# Altium footprint library Package_DFN_QFN.PcbLib: 735 footprints (part 5 of 46)
Each footprint in its own frame and in the unit in brackets; x right, y up, seen from the top. Pads: shape width x height; smd on the part's side, far side on the other; paste and mask are expansions set on the pad; w line width, h text height; cw(c..) or ccw(c..) is an arc to the next point about the centre after c.
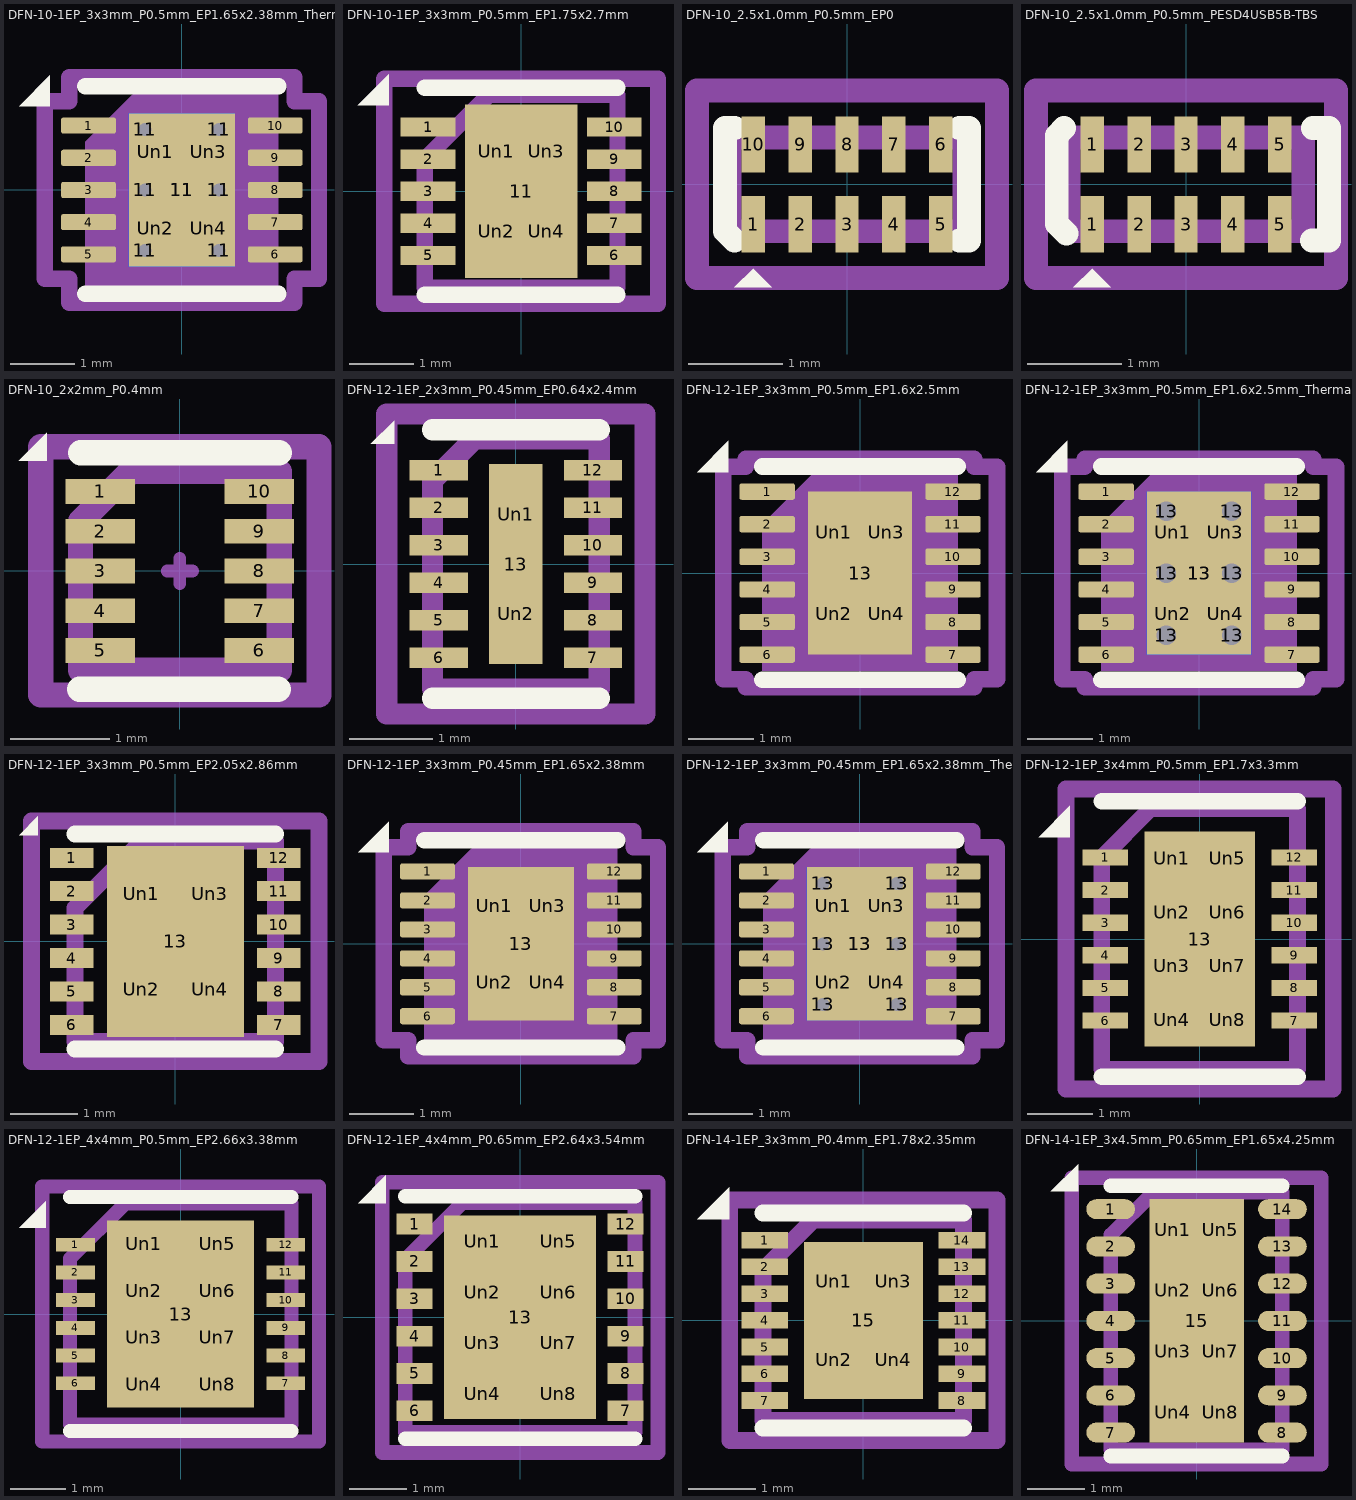
[diagram p4: the footprints below, top view; thin cyan lines are the x and y axes]

## DFN-10-1EP_3x3mm_P0.5mm_EP1.65x2.38mm_ThermalVias [mm] "DFN-10-1EP_3x3mm_P0.5mm_EP1.65x2.38mm_ThermalVias"
pads (22):
  rrect25% 0.85x0.25 smd: 1(-1.45,1) 2(-1.45,0.5) 3(-1.45,0) 4(-1.45,-0.5) 5(-1.45,-1) 6(1.45,-1) 7(1.45,-0.5) 8(1.45,0) 9(1.45,0.5) 10(1.45,1)
  round 0.5 hole 0.2: 11(-0.575,-0.94) 11(-0.575,0) 11(-0.575,0.94) 11(0.575,-0.94) 11(0.575,0) 11(0.575,0.94)
  rect 1.65x2.38 smd: 11(0,0)
  rect 1.65x2.38 smd far side: 11(0,0)
  rrect25% 0.67x0.96 on Top Paste: Un1(-0.41,0.595) Un2(-0.41,-0.595) Un3(0.41,0.595) Un4(0.41,-0.595)
F.SilkS:
  region: -2.05,1.3 -2.53,1.3 -2.05,1.78
  lines w0.254: -1.5,-1.61 1.5,-1.61 ; -1.5,1.61 1.5,1.61
Top Component Center:
  lines w0.127: -0.127,0 0.127,0 -0.127,0 ; 0,-0.127 0,0.127 0,-0.127
Top Assembly:
  region: 1.5,-1.5 -1.5,-1.5 -1.5,0.75 -0.75,1.5 1.5,1.5
Top Courtyard:
  lines w0.254: -2.13,-1.38 -1.75,-1.38 -1.75,-1.75 1.75,-1.75 1.75,-1.38 2.13,-1.38 2.13,1.38 1.75,1.38 1.75,1.75 -1.75,1.75 -1.75,1.38 -2.13,1.38 -2.13,-1.38
Top Designator:
  text ".Designator" at -3.43,-0.344 h1.52
3D body "DFN-10-1EP_3x3mm_P0.5mm_EP1.65x2.38mm.step": height 0.76, standoff 0, extent -1.5,-1.488 1.5,1.488

## DFN-10-1EP_3x3mm_P0.5mm_EP1.75x2.7mm [mm] "DFN-10-1EP_3x3mm_P0.5mm_EP1.75x2.7mm"
pads (15):
  rect 0.85x0.3 smd: 1(-1.45,1) 2(-1.45,0.5) 3(-1.45,0) 4(-1.45,-0.5) 5(-1.45,-1) 6(1.45,-1) 7(1.45,-0.5) 8(1.45,0) 9(1.45,0.5) 10(1.45,1)
  rect 1.75x2.7 smd: 11(0,0)
  rect 0.6x1.05 on Top Paste: Un1(-0.387,0.62) Un2(-0.387,-0.62) Un3(0.387,0.62) Un4(0.387,-0.62)
F.SilkS:
  region: -2.06,1.34 -2.54,1.34 -2.06,1.82
  lines w0.254: -1.5,-1.61 1.5,-1.61 ; -1.5,1.61 1.5,1.61
Top Component Center:
  lines w0.127: -0.127,0 0.127,0 -0.127,0 ; 0,-0.127 0,0.127 0,-0.127
Top Assembly:
  lines w0.254: -1.5,-1.5 1.5,-1.5 1.5,1.5 -0.5,1.5 -1.5,0.5 -1.5,-1.5
Top Courtyard:
  lines w0.254: -2.13,-1.75 2.13,-1.75 2.13,1.75 -2.13,1.75 -2.13,-1.75
Top Designator:
  text ".Designator" at -3.43,-0.344 h1.52
3D body "DFN-10-1EP_3x3mm_P0.5mm_EP1.55x2.48mm.step": height 0.77, standoff 0, extent -1.5,-1.49 1.5,1.49

## DFN-10_2.5x1.0mm_P0.5mm_EP0 [mm]
pads (10):
  rect 0.25x0.6 smd: 1(-1,-0.425) 2(-0.5,-0.425) 3(0,-0.425) 4(0.5,-0.425) 5(1,-0.425) 6(1,0.425) 7(0.5,0.425) 8(0,0.425) 9(-0.5,0.425) 10(-1,0.425)
F.SilkS:
  region: -0.8,-1.1 -1.2,-1.1 -1,-0.9
  lines w0.254: -1.2,-0.6 -1.3,-0.5 -1.3,0.5 -1.3,0.6 -1.2,0.6 ; 1.2,-0.6 1.3,-0.6 1.3,0.6 1.2,0.6
Top Assembly:
  region: -0.8,-1.1 -1.2,-1.1 -1,-0.9
  lines w0.254: -1.25,-0.5 -1.25,0.5 1.25,0.5 1.25,-0.5 -1.25,-0.5
  text "'.Designator'" at -3.07,-0.287 h1.27
Top Courtyard:
  lines w0.254: -1.6,-1 -1.6,1 1.6,1 1.6,-1 -1.6,-1
3D body "DFN-10_2.5x1.0mm_P0.5mm_EP0.stp": height 0.79, standoff 0.04, extent -1.25,-0.425 1.25,0.575

## DFN-10_2.5x1.0mm_P0.5mm_PESD4USB5B-TBS [mm]
pads (10):
  rect 0.25x0.6 smd: 1(-1,-0.425) 1(-1,0.425) 2(-0.5,-0.425) 2(-0.5,0.425) 3(0,-0.425) 3(0,0.425) 4(0.5,-0.425) 4(0.5,0.425) 5(1,-0.425) 5(1,0.425)
F.SilkS:
  region: -0.8,-1.1 -1.2,-1.1 -1,-0.9
  lines w0.254: -1.3,0.6 -1.378,0.522 -1.378,-0.422 -1.275,-0.525 ; 1.343,-0.6 1.524,-0.6 1.524,0.6 1.352,0.6
Top Assembly:
  region: -0.8,-1.1 -1.2,-1.1 -1,-0.9
  lines w0.254: -1.25,-0.5 -1.25,0.5 1.25,0.5 1.25,-0.5 -1.25,-0.5
  text "'.Designator'" at -3.07,-0.287 h1.27
Top Courtyard:
  lines w0.254: -1.6,-1 1.6,-1 1.6,1 -1.6,1 -1.6,-1
3D body "DFN-10_2.5x1.0mm_P0.5mm_EP0.stp": height 0.79, standoff 0.04, extent -1.25,-0.425 1.25,0.575

## DFN-10_2x2mm_P0.4mm [mm] "DFN-10_2x2mm_P0.4mm"
pads (10):
  rect 0.7x0.25 smd: 1(-0.8,0.8) 2(-0.8,0.4) 3(-0.8,0) 4(-0.8,-0.4) 5(-0.8,-0.8) 6(0.8,-0.8) 7(0.8,-0.4) 8(0.8,0) 9(0.8,0.4) 10(0.8,0.8)
F.SilkS:
  region: -1.34,1.11 -1.62,1.11 -1.34,1.39
  lines w0.254: -1.01,-1.19 0.99,-1.19 ; -1,1.19 1,1.19
Top Component Center:
  lines w0.127: -0.127,0 0.127,0 -0.127,0 ; 0,-0.127 0,0.127 0,-0.127
Top Assembly:
  lines w0.254: -1,-1 -1,0.5 -0.5,1 1,1 1,-1 -1,-1
Top Courtyard:
  lines w0.254: -1.4,-1.25 -1.4,1.25 1.4,1.25 1.4,-1.25 -1.4,-1.25
Top Designator:
  text ".Designator" at -2.251,-0.226 h1

## DFN-12-1EP_2x3mm_P0.45mm_EP0.64x2.4mm [mm] "DFN-12-1EP_2x3mm_P0.45mm_EP0.64x2.4mm"
pads (15):
  rect 0.7x0.25 smd: 1(-0.925,1.125) 2(-0.925,0.675) 3(-0.925,0.225) 4(-0.925,-0.225) 5(-0.925,-0.675) 6(-0.925,-1.125) 7(0.925,-1.125) 8(0.925,-0.675) 9(0.925,-0.225) 10(0.925,0.225) 11(0.925,0.675) 12(0.925,1.125)
  rect 0.64x2.4 smd: 13(0,0)
  rect 0.5x1 on Top Paste: Un1(0,0.6) Un2(0,-0.6)
F.SilkS:
  region: -1.46,1.44 -1.74,1.44 -1.46,1.72
  lines w0.254: -1,-1.61 1,-1.61 ; -1,1.61 1,1.61
Top Component Center:
  lines w0.127: -0.127,0 0.127,0 -0.127,0 ; 0,-0.127 0,0.127 0,-0.127
Top Assembly:
  lines w0.254: -1,-1.5 1,-1.5 1,1.5 -0.5,1.5 -1,1 -1,-1.5
Top Courtyard:
  lines w0.254: -1.55,-1.8 1.55,-1.8 1.55,1.8 -1.55,1.8 -1.55,-1.8
Top Designator:
  text ".Designator" at -2.251,-0.226 h1
3D body "DFN-12-1EP_2x3mm_P0.45mm_EP0.64x2.4mm.step": height 0.77, standoff 0, extent -1,-1.49 1,1.49

## DFN-12-1EP_3x3mm_P0.5mm_EP1.6x2.5mm [mm] "DFN-12-1EP_3x3mm_P0.5mm_EP1.6x2.5mm"
pads (17):
  rrect25% 0.85x0.25 smd: 1(-1.425,1.25) 2(-1.425,0.75) 3(-1.425,0.25) 4(-1.425,-0.25) 5(-1.425,-0.75) 6(-1.425,-1.25) 7(1.425,-1.25) 8(1.425,-0.75) 9(1.425,-0.25) 10(1.425,0.25) 11(1.425,0.75) 12(1.425,1.25)
  rect 1.6x2.5 smd: 13(0,0)
  rrect25% 0.64x1.01 on Top Paste: Un1(-0.4,0.625) Un2(-0.4,-0.625) Un3(0.4,0.625) Un4(0.4,-0.625)
F.SilkS:
  region: -2.02,1.55 -2.5,1.55 -2.02,2.03
  lines w0.254: -1.5,-1.635 1.5,-1.635 ; -1.5,1.635 1.5,1.635
Top Component Center:
  lines w0.127: -0.127,0 0.127,0 -0.127,0 ; 0,-0.127 0,0.127 0,-0.127
Top Assembly:
  region: 1.5,-1.5 -1.5,-1.5 -1.5,0.75 -0.75,1.5 1.5,1.5
Top Courtyard:
  lines w0.254: -2.1,-1.63 -1.75,-1.63 -1.75,-1.75 1.75,-1.75 1.75,-1.63 2.1,-1.63 2.1,1.63 1.75,1.63 1.75,1.75 -1.75,1.75 -1.75,1.63 -2.1,1.63 -2.1,-1.63
Top Designator:
  text ".Designator" at -3.43,-0.344 h1.52

## DFN-12-1EP_3x3mm_P0.5mm_EP1.6x2.5mm_ThermalVias [mm] "DFN-12-1EP_3x3mm_P0.5mm_EP1.6x2.5mm_ThermalVias"
pads (24):
  rrect25% 0.85x0.25 smd: 1(-1.425,1.25) 2(-1.425,0.75) 3(-1.425,0.25) 4(-1.425,-0.25) 5(-1.425,-0.75) 6(-1.425,-1.25) 7(1.425,-1.25) 8(1.425,-0.75) 9(1.425,-0.25) 10(1.425,0.25) 11(1.425,0.75) 12(1.425,1.25)
  round 0.6 hole 0.3: 13(-0.5,-0.95) 13(-0.5,0) 13(-0.5,0.95) 13(0.5,-0.95) 13(0.5,0) 13(0.5,0.95)
  rect 1.6x2.5 smd: 13(0,0)
  rect 1.6x2.5 smd far side: 13(0,0)
  rrect25% 0.64x1.01 on Top Paste: Un1(-0.4,0.625) Un2(-0.4,-0.625) Un3(0.4,0.625) Un4(0.4,-0.625)
F.SilkS:
  region: -2.02,1.55 -2.5,1.55 -2.02,2.03
  lines w0.254: -1.5,-1.635 1.5,-1.635 ; -1.5,1.635 1.5,1.635
Top Component Center:
  lines w0.127: -0.127,0 0.127,0 -0.127,0 ; 0,-0.127 0,0.127 0,-0.127
Top Assembly:
  region: 1.5,-1.5 -1.5,-1.5 -1.5,0.75 -0.75,1.5 1.5,1.5
Top Courtyard:
  lines w0.254: -2.1,-1.63 -1.75,-1.63 -1.75,-1.75 1.75,-1.75 1.75,-1.63 2.1,-1.63 2.1,1.63 1.75,1.63 1.75,1.75 -1.75,1.75 -1.75,1.63 -2.1,1.63 -2.1,-1.63
Top Designator:
  text ".Designator" at -3.43,-0.344 h1.52

## DFN-12-1EP_3x3mm_P0.5mm_EP2.05x2.86mm [mm] "DFN-12-1EP_3x3mm_P0.5mm_EP2.05x2.86mm"
pads (17):
  rect 0.65x0.3 smd: 1(-1.55,1.25) 2(-1.55,0.75) 3(-1.55,0.25) 4(-1.55,-0.25) 5(-1.55,-0.75) 6(-1.55,-1.25) 7(1.55,-1.25) 8(1.55,-0.75) 9(1.55,-0.25) 10(1.55,0.25) 11(1.55,0.75) 12(1.55,1.25)
  rect 2.05x2.86 smd: 13(0,0)
  rect 0.8x1.2 on Top Paste: Un1(-0.513,0.715) Un2(-0.513,-0.715) Un3(0.513,0.715) Un4(0.513,-0.715)
F.SilkS:
  region: -2.06,1.59 -2.34,1.59 -2.06,1.87
  lines w0.254: -1.5,-1.61 1.5,-1.61 ; -1.5,1.61 1.5,1.61
Top Component Center:
  lines w0.127: -0.127,0 0.127,0 -0.127,0 ; 0,-0.127 0,0.127 0,-0.127
Top Assembly:
  lines w0.254: -1.5,-1.5 1.5,-1.5 1.5,1.5 -0.5,1.5 -1.5,0.5 -1.5,-1.5
Top Courtyard:
  lines w0.254: -2.15,-1.8 2.15,-1.8 2.15,1.8 -2.15,1.8 -2.15,-1.8
Top Designator:
  text ".Designator" at -3.43,-0.344 h1.52

## DFN-12-1EP_3x3mm_P0.45mm_EP1.65x2.38mm [mm] "DFN-12-1EP_3x3mm_P0.45mm_EP1.65x2.38mm"
pads (17):
  rrect25% 0.85x0.25 smd: 1(-1.45,1.125) 2(-1.45,0.675) 3(-1.45,0.225) 4(-1.45,-0.225) 5(-1.45,-0.675) 6(-1.45,-1.125) 7(1.45,-1.125) 8(1.45,-0.675) 9(1.45,-0.225) 10(1.45,0.225) 11(1.45,0.675) 12(1.45,1.125)
  rect 1.65x2.38 smd: 13(0,0)
  rrect25% 0.67x0.96 on Top Paste: Un1(-0.41,0.595) Un2(-0.41,-0.595) Un3(0.41,0.595) Un4(0.41,-0.595)
F.SilkS:
  region: -2.05,1.42 -2.53,1.42 -2.05,1.9
  lines w0.254: -1.5,-1.61 1.5,-1.61 ; -1.5,1.61 1.5,1.61
Top Component Center:
  lines w0.127: -0.127,0 0.127,0 -0.127,0 ; 0,-0.127 0,0.127 0,-0.127
Top Assembly:
  region: 1.5,-1.5 -1.5,-1.5 -1.5,0.75 -0.75,1.5 1.5,1.5
Top Courtyard:
  lines w0.254: -2.13,-1.5 -1.75,-1.5 -1.75,-1.75 1.75,-1.75 1.75,-1.5 2.13,-1.5 2.13,1.5 1.75,1.5 1.75,1.75 -1.75,1.75 -1.75,1.5 -2.13,1.5 -2.13,-1.5
Top Designator:
  text ".Designator" at -3.43,-0.344 h1.52
3D body "DFN-12-1EP_3x3mm_P0.45mm_EP1.65x2.38mm.step": height 0.75, standoff 0, extent -1.5,-1.488 1.5,1.488

## DFN-12-1EP_3x3mm_P0.45mm_EP1.65x2.38mm_ThermalVias [mm] "DFN-12-1EP_3x3mm_P0.45mm_EP1.65x2.38mm_ThermalVias"
pads (24):
  rrect25% 0.85x0.25 smd: 1(-1.45,1.125) 2(-1.45,0.675) 3(-1.45,0.225) 4(-1.45,-0.225) 5(-1.45,-0.675) 6(-1.45,-1.125) 7(1.45,-1.125) 8(1.45,-0.675) 9(1.45,-0.225) 10(1.45,0.225) 11(1.45,0.675) 12(1.45,1.125)
  round 0.5 hole 0.2: 13(-0.575,-0.94) 13(-0.575,0) 13(-0.575,0.94) 13(0.575,-0.94) 13(0.575,0) 13(0.575,0.94)
  rect 1.65x2.38 smd: 13(0,0)
  rect 1.65x2.38 smd far side: 13(0,0)
  rrect25% 0.67x0.96 on Top Paste: Un1(-0.41,0.595) Un2(-0.41,-0.595) Un3(0.41,0.595) Un4(0.41,-0.595)
F.SilkS:
  region: -2.05,1.42 -2.53,1.42 -2.05,1.9
  lines w0.254: -1.5,-1.61 1.5,-1.61 ; -1.5,1.61 1.5,1.61
Top Component Center:
  lines w0.127: -0.127,0 0.127,0 -0.127,0 ; 0,-0.127 0,0.127 0,-0.127
Top Assembly:
  region: 1.5,-1.5 -1.5,-1.5 -1.5,0.75 -0.75,1.5 1.5,1.5
Top Courtyard:
  lines w0.254: -2.13,-1.5 -2.13,1.5 -1.75,1.5 -1.75,1.75 1.75,1.75 1.75,1.5 2.13,1.5 2.13,-1.5 1.75,-1.5 1.75,-1.75 -1.75,-1.75 -1.75,-1.5 -2.13,-1.5
Top Designator:
  text ".Designator" at -3.43,-0.344 h1.52
3D body "DFN-12-1EP_3x3mm_P0.45mm_EP1.65x2.38mm.step": height 0.75, standoff 0, extent -1.5,-1.488 1.5,1.488

## DFN-12-1EP_3x4mm_P0.5mm_EP1.7x3.3mm [mm] "DFN-12-1EP_3x4mm_P0.5mm_EP1.7x3.3mm"
pads (21):
  rect 0.7x0.25 smd: 1(-1.45,1.25) 2(-1.45,0.75) 3(-1.45,0.25) 4(-1.45,-0.25) 5(-1.45,-0.75) 6(-1.45,-1.25) 7(1.45,-1.25) 8(1.45,-0.75) 9(1.45,-0.25) 10(1.45,0.25) 11(1.45,0.75) 12(1.45,1.25)
  rect 1.7x3.3 smd: 13(0,0)
  rect 0.685x0.67 on Top Paste: Un1(-0.425,1.238) Un2(-0.425,0.413) Un3(-0.425,-0.413) Un4(-0.425,-1.238) Un5(0.425,1.238) Un6(0.425,0.413) Un7(0.425,-0.413) Un8(0.425,-1.238)
F.SilkS:
  region: -1.99,1.56 -2.47,1.56 -1.99,2.04
  lines w0.254: -1.5,-2.11 1.5,-2.11 ; -1.5,2.11 1.5,2.11
Top Component Center:
  lines w0.127: -0.127,0 0.127,0 -0.127,0 ; 0,-0.127 0,0.127 0,-0.127
Top Assembly:
  lines w0.254: -1.5,-2 1.5,-2 1.5,2 -0.75,2 -1.5,1.25 -1.5,-2
Top Courtyard:
  lines w0.254: -2.05,-2.3 2.05,-2.3 2.05,2.3 -2.05,2.3 -2.05,-2.3
Top Designator:
  text ".Designator" at -3.43,-0.344 h1.52
3D body "DFN-12-1EP_3x4mm_P0.5mm_EP1.7x3.3mm.step": height 0.77, standoff 0, extent -1.5,-1.99 1.5,1.99

## DFN-12-1EP_4x4mm_P0.5mm_EP2.66x3.38mm [mm] "DFN-12-1EP_4x4mm_P0.5mm_EP2.66x3.38mm"
pads (21):
  rect 0.7x0.25 smd: 1(-1.9,1.25) 2(-1.9,0.75) 3(-1.9,0.25) 4(-1.9,-0.25) 5(-1.9,-0.75) 6(-1.9,-1.25) 7(1.9,-1.25) 8(1.9,-0.75) 9(1.9,-0.25) 10(1.9,0.25) 11(1.9,0.75) 12(1.9,1.25)
  rect 2.66x3.38 smd: 13(0,0)
  rect 1.15x0.63 on Top Paste: Un1(-0.665,1.268) Un2(-0.665,0.423) Un3(-0.665,-0.423) Un4(-0.665,-1.268) Un5(0.665,1.268) Un6(0.665,0.423) Un7(0.665,-0.423) Un8(0.665,-1.268)
F.SilkS:
  region: -2.44,1.56 -2.92,1.56 -2.44,2.04
  lines w0.254: -2,-2.11 2,-2.11 ; -2,2.11 2,2.11
Top Component Center:
  lines w0.127: -0.127,0 0.127,0 -0.127,0 ; 0,-0.127 0,0.127 0,-0.127
Top Assembly:
  lines w0.254: -2,-2 -2,1 -1,2 2,2 2,-2 -2,-2
Top Courtyard:
  lines w0.254: -2.5,-2.3 -2.5,2.3 2.5,2.3 2.5,-2.3 -2.5,-2.3
Top Designator:
  text ".Designator" at -3.43,-0.344 h1.52
3D body "DFN-12-1EP_4x4mm_P0.5mm_EP2.66x3.38mm.step": height 0.92, standoff 0, extent -2,-1.99 2,1.99

## DFN-12-1EP_4x4mm_P0.65mm_EP2.64x3.54mm [mm] "DFN-12-1EP_4x4mm_P0.65mm_EP2.64x3.54mm"
pads (21):
  rect 0.63x0.36 smd: 1(-1.835,1.625) 2(-1.835,0.975) 3(-1.835,0.325) 4(-1.835,-0.325) 5(-1.835,-0.975) 6(-1.835,-1.625) 7(1.835,-1.625) 8(1.835,-0.975) 9(1.835,-0.325) 10(1.835,0.325) 11(1.835,0.975) 12(1.835,1.625)
  rect 2.64x3.54 smd: 13(0,0)
  rect 1.1x0.7 on Top Paste: Un1(-0.66,1.328) Un2(-0.66,0.443) Un3(-0.66,-0.443) Un4(-0.66,-1.328) Un5(0.66,1.328) Un6(0.66,0.443) Un7(0.66,-0.443) Un8(0.66,-1.328)
F.SilkS:
  region: -2.34,1.99 -2.82,1.99 -2.34,2.47
  lines w0.254: -2,-2.11 2,-2.11 ; -2,2.11 2,2.11
Top Component Center:
  lines w0.127: -0.127,0 0.127,0 -0.127,0 ; 0,-0.127 0,0.127 0,-0.127
Top Assembly:
  lines w0.254: -2,-2 -2,1 -1,2 2,2 2,-2 -2,-2
Top Courtyard:
  lines w0.254: -2.4,-2.35 -2.4,2.35 2.4,2.35 2.4,-2.35 -2.4,-2.35
Top Designator:
  text ".Designator" at -3.43,-0.344 h1.52
3D body "DFN-12-1EP_4x4mm_P0.65mm_EP2.64x3.54mm.step": height 0.92, standoff 0, extent -2,-1.99 2,1.99

## DFN-14-1EP_3x3mm_P0.4mm_EP1.78x2.35mm [mm] "DFN-14-1EP_3x3mm_P0.4mm_EP1.78x2.35mm"
pads (19):
  rect 0.7x0.25 smd: 1(-1.475,1.2) 2(-1.475,0.8) 3(-1.475,0.4) 4(-1.475,0) 5(-1.475,-0.4) 6(-1.475,-0.8) 7(-1.475,-1.2) 8(1.475,-1.2) 9(1.475,-0.8) 10(1.475,-0.4) 11(1.475,0) 12(1.475,0.4) 13(1.475,0.8) 14(1.475,1.2)
  rect 1.78x2.35 smd: 15(0,0)
  rect 0.7x0.97 on Top Paste: Un1(-0.445,0.587) Un2(-0.445,-0.587) Un3(0.45,0.587) Un4(0.45,-0.587)
F.SilkS:
  region: -2.01,1.51 -2.49,1.51 -2.01,1.99
  lines w0.254: -1.5,-1.61 1.5,-1.61 ; -1.5,1.61 1.5,1.61
Top Component Center:
  lines w0.127: -0.127,0 0.127,0 -0.127,0 ; 0,-0.127 0,0.127 0,-0.127
Top Assembly:
  lines w0.254: -1.5,-1.5 1.5,-1.5 1.5,1.5 -0.75,1.5 -1.5,0.75 -1.5,-1.5
Top Courtyard:
  lines w0.254: -2,-1.8 2,-1.8 2,1.8 -2,1.8 -2,-1.8
Top Designator:
  text ".Designator" at -2.251,-0.226 h1
3D body "DFN-14-1EP_3x3mm_P0.4mm_EP1.78x2.35mm.step": height 0.77, standoff 0, extent -1.5,-1.49 1.5,1.49

## DFN-14-1EP_3x4.5mm_P0.65mm_EP1.65x4.25mm [mm] "DFN-14-1EP_3x4.5mm_P0.65mm_EP1.65x4.25mm"
pads (23):
  rrect100% 0.85x0.35 smd: 1(-1.5,1.95) 2(-1.5,1.3) 3(-1.5,0.65) 4(-1.5,0) 5(-1.5,-0.65) 6(-1.5,-1.3) 7(-1.5,-1.95) 8(1.5,-1.95) 9(1.5,-1.3) 10(1.5,-0.65) 11(1.5,0) 12(1.5,0.65) 13(1.5,1.3) 14(1.5,1.95)
  rect 1.65x4.25 smd: 15(0,0)
  rect 0.66x0.85 on Top Paste: Un1(-0.413,1.594) Un2(-0.413,0.531) Un3(-0.413,-0.531) Un4(-0.413,-1.594) Un5(0.413,1.594) Un6(0.413,0.531) Un7(0.413,-0.531) Un8(0.413,-1.594)
F.SilkS:
  region: -2.07,2.26 -2.55,2.26 -2.07,2.74
  lines w0.254: -1.5,-2.36 1.5,-2.36 ; -1.5,2.36 1.5,2.36
Top Component Center:
  lines w0.127: -0.127,0 0.127,0 -0.127,0 ; 0,-0.127 0,0.127 0,-0.127
Top Assembly:
  lines w0.254: -1.5,-2.25 -1.5,1.5 -0.75,2.25 1.5,2.25 1.5,-2.25 -1.5,-2.25
Top Courtyard:
  lines w0.254: -2.18,-2.5 -2.18,2.5 2.18,2.5 2.18,-2.5 -2.18,-2.5
Top Designator:
  text ".Designator" at -3.43,-0.344 h1.52